# EAGLE library part BM20C (library BM20C-V7-LIB)
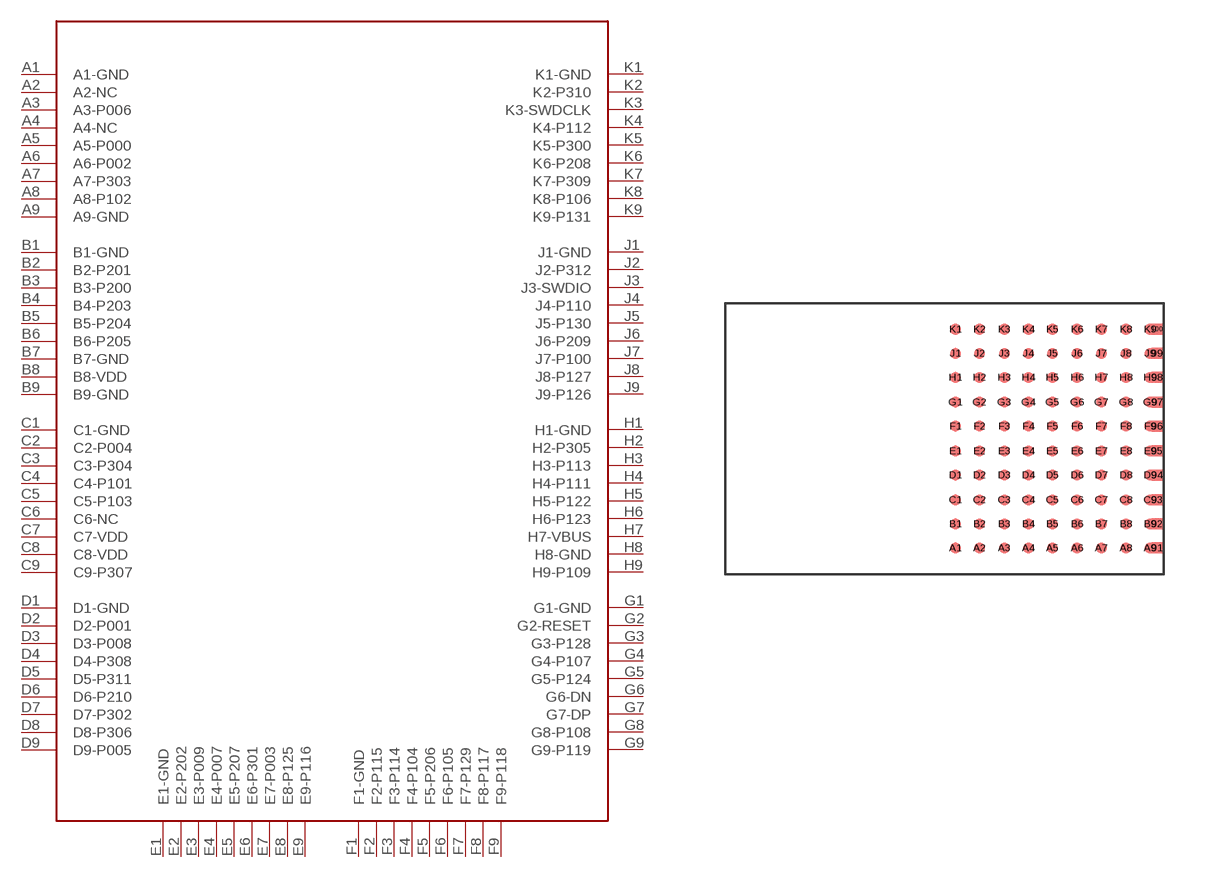
[diagram p0: symbol with the pads of BM20C; footprint BM20C]

Designator prefix -

## BM20C  [BM20C]
A1  A1-GND
A2  A2-NC
A3  A3-P006
A4  A4-NC
A5  A5-P000
A6  A6-P002
A7  A7-P303
A8  A8-P102
A9  A9-GND
B1  B1-GND
B2  B2-P201
B3  B3-P200
B4  B4-P203
B5  B5-P204
B6  B6-P205
B7  B7-GND
B8  B8-VDD
B9  B9-GND
C1  C1-GND
C2  C2-P004
C3  C3-P304
C4  C4-P101
C5  C5-P103
C6  C6-NC
C7  C7-VDD
C8  C8-VDD
C9  C9-P307
D1  D1-GND
D2  D2-P001
D3  D3-P008
D4  D4-P308
D5  D5-P311
D6  D6-P210
D7  D7-P302
D8  D8-P306
D9  D9-P005
E1  E1-GND
E2  E2-P202
E3  E3-P009
E4  E4-P007
E5  E5-P207
E6  E6-P301
E7  E7-P003
E8  E8-P125
E9  E9-P116
F1  F1-GND
F2  F2-P115
F3  F3-P114
F4  F4-P104
F5  F5-P206
F6  F6-P105
F7  F7-P129
F8  F8-P117
F9  F9-P118
G1  G1-GND
G2  G2-RESET
G3  G3-P128
G4  G4-P107
G5  G5-P124
G6  G6-DN
G7  G7-DP
G8  G8-P108
G9  G9-P119
H1  H1-GND
H2  H2-P305
H3  H3-P113
H4  H4-P111
H5  H5-P122
H6  H6-P123
H7  H7-VBUS
H8  H8-GND
H9  H9-P109
J1  J1-GND
J2  J2-P312
J3  J3-SWDIO
J4  J4-P110
J5  J5-P130
J6  J6-P209
J7  J7-P100
J8  J8-P127
J9  J9-P126
K1  K1-GND
K2  K2-P310
K3  K3-SWDCLK
K4  K4-P112
K5  K5-P300
K6  K6-P208
K7  K7-P309
K8  K8-P106
K9  K9-P131

## Footprint BM20C (pad centres in mm)
Original name BM20-C
smd 0.406 x 0.406: 91 4.75,-4.039; 92 4.75,-3.15; 93 4.75,-2.261; 94 4.75,-1.346; 95 4.75,-0.457; 96 4.75,0.457; 97 4.75,1.346; 98 4.75,2.261; 99 4.75,3.15; 100 4.75,4.039; A1 -2.692,-4.039; A2 -1.803,-4.039; A3 -0.889,-4.039; A4 0,-4.039; A5 0.889,-4.039; A6 1.803,-4.039; A7 2.692,-4.039; A8 3.607,-4.039; A9 4.496,-4.039; B1 -2.692,-3.15; B2 -1.803,-3.15; B3 -0.889,-3.15; B4 0,-3.15; B5 0.889,-3.15; B6 1.803,-3.15; B7 2.692,-3.15; B8 3.607,-3.15; B9 4.496,-3.15; C1 -2.692,-2.261; C2 -1.803,-2.261; C3 -0.889,-2.261; C4 0,-2.261; C5 0.889,-2.261; C6 1.803,-2.261; C7 2.692,-2.261; C8 3.607,-2.261; C9 4.496,-2.261; D1 -2.692,-1.346; D2 -1.803,-1.346; D3 -0.889,-1.346; D4 0,-1.346; D5 0.889,-1.346; D6 1.803,-1.346; D7 2.692,-1.346; D8 3.607,-1.346; D9 4.496,-1.346; E1 -2.692,-0.457; E2 -1.803,-0.457; E3 -0.889,-0.457; E4 0,-0.457; E5 0.889,-0.457; E6 1.803,-0.457; E7 2.692,-0.457; E8 3.607,-0.457; E9 4.496,-0.457; F1 -2.692,0.457; F2 -1.803,0.457; F3 -0.889,0.457; F4 0,0.457; F5 0.889,0.457; F6 1.803,0.457; F7 2.692,0.457; F8 3.607,0.457; F9 4.496,0.457; G1 -2.692,1.346; G2 -1.803,1.346; G3 -0.889,1.346; G4 0,1.346; G5 0.889,1.346; G6 1.803,1.346; G7 2.692,1.346; G8 3.607,1.346; G9 4.496,1.346; H1 -2.692,2.261; H2 -1.803,2.261; H3 -0.889,2.261; H4 0,2.261; H5 0.889,2.261; H6 1.803,2.261; H7 2.692,2.261; H8 3.607,2.261; H9 4.496,2.261; J1 -2.692,3.15; J2 -1.803,3.15; J3 -0.889,3.15; J4 0,3.15; J5 0.889,3.15; J6 1.803,3.15; J7 2.692,3.15; J8 3.607,3.15; J9 4.496,3.15; K1 -2.692,4.039; K2 -1.803,4.039; K3 -0.889,4.039; K4 0,4.039; K5 0.889,4.039; K6 1.803,4.039; K7 2.692,4.039; K8 3.607,4.039; K9 4.496,4.039